# Altium footprint library MY_LIB_Connectors_JST.PcbLib: 118 footprints (part 5 of 8)
Each footprint in its own frame and in the unit in brackets; x right, y up, seen from the top. Pads: shape width x height; smd on the part's side, far side on the other; paste and mask are expansions set on the pad; w line width, h text height; cw(c..) or ccw(c..) is an arc to the next point about the centre after c.
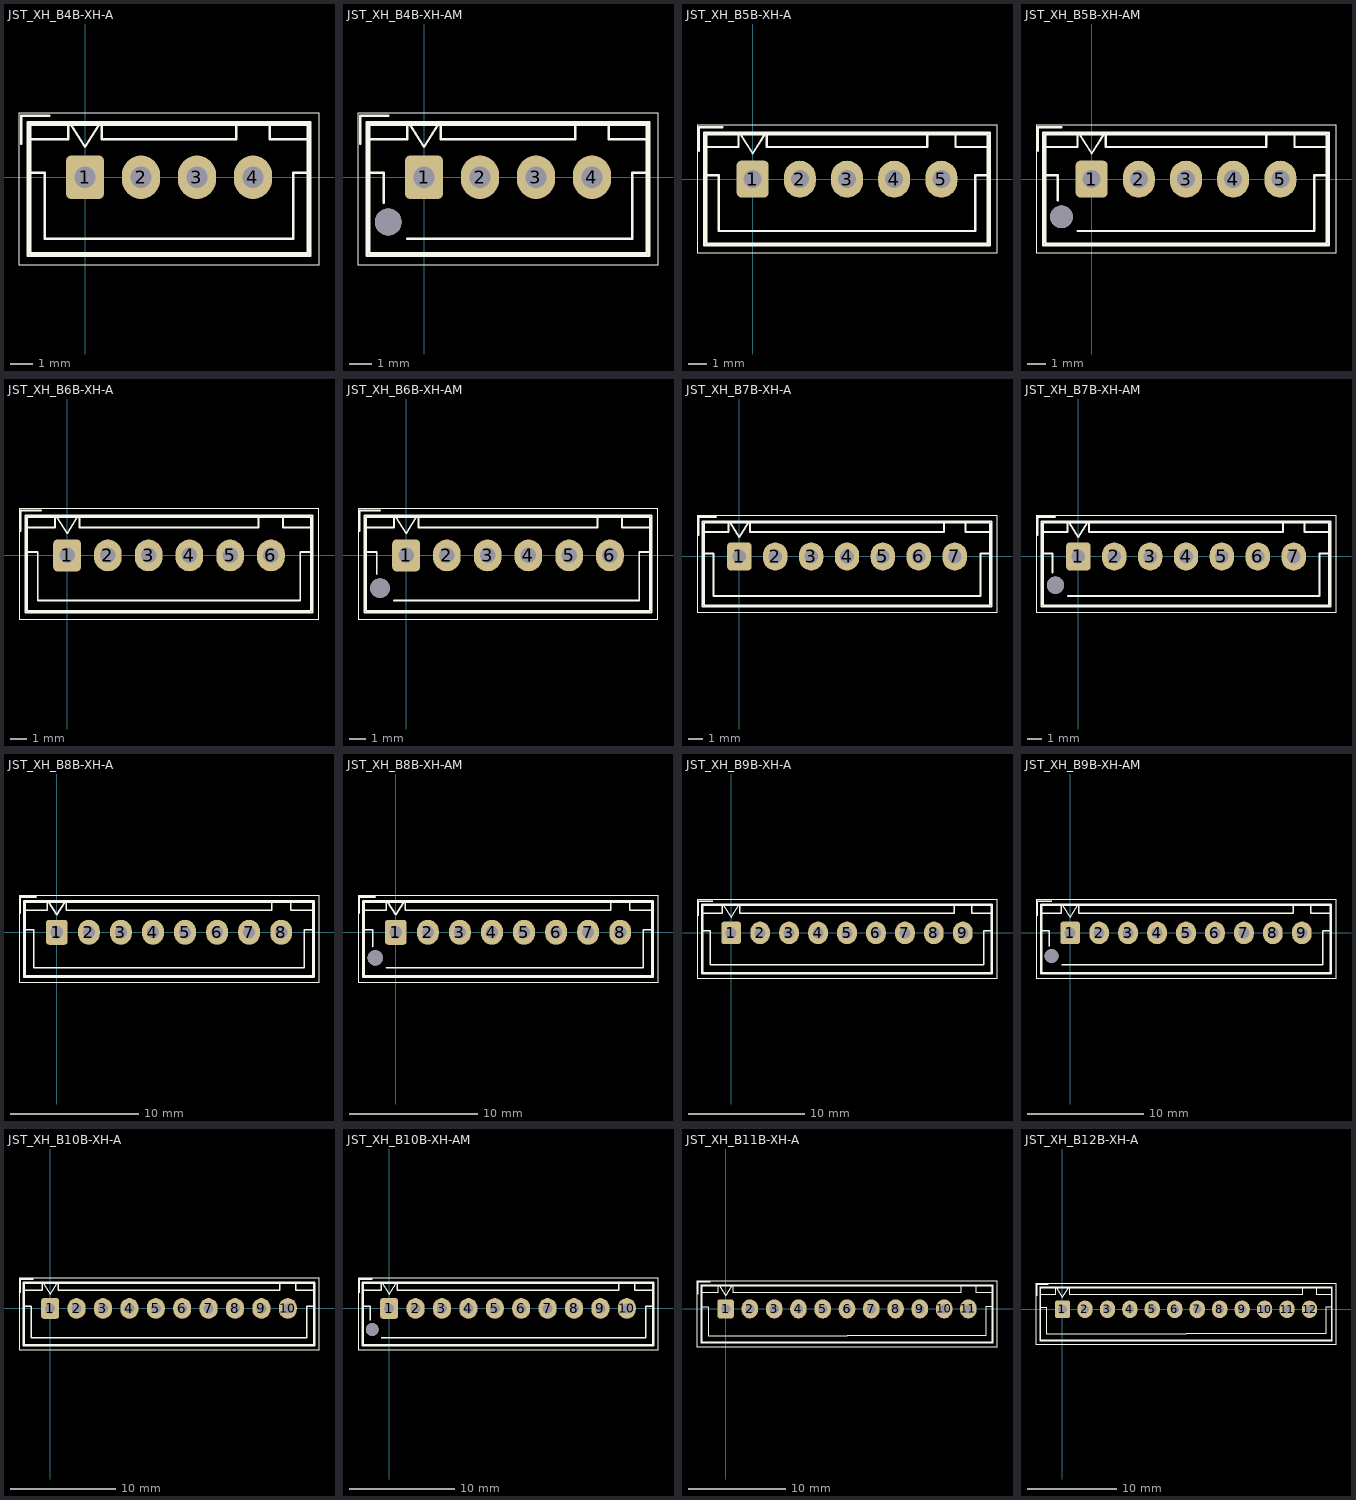
[diagram p4: the footprints below, top view; thin cyan lines are the x and y axes]

## JST_XH_B4B-XH-A [mm] "JST B4B-XH-A; reviewed KiCad footprint; ready STEP reference model"
height 7
pads (4):
  rrect29% 1.7x1.95 hole 0.95: 1(0,0)
  oval 1.7x1.95 hole 0.95: 2(2.5,0) 3(5,0) 4(7.5,0)
Top Overlay:
  lines w0.05: -2.95,-3.9 -2.95,2.85 10.45,2.85 10.45,-3.9 -2.95,-3.9
  lines w0.1: -0.625,2.35 0,1.35 0.625,2.35 ; -2.45,-3.4 -2.45,2.35 9.95,2.35 9.95,-3.4 -2.45,-3.4
  lines w0.12: -2.85,1.5 -2.85,2.75 -1.6,2.75 ; -2.55,0.2 -1.8,0.2 -1.8,-2.75 3.75,-2.75 9.3,-2.75 9.3,0.2 10.05,0.2 ; -2.56,-3.51 -2.56,2.46 10.06,2.46 10.06,-3.51 -2.56,-3.51 ; -2.55,1.7 -2.55,2.45 -0.75,2.45 -0.75,1.7 -2.55,1.7 ; 0.75,1.7 0.75,2.45 6.75,2.45 6.75,1.7 0.75,1.7 ; 8.25,1.7 8.25,2.45 10.05,2.45 10.05,1.7 8.25,1.7
3D body "JST_XH_B4B-XH-A_1x04_P2.50mm_Vertical.step": height 7, standoff -3.4, extent -2.45,-3.4 9.95,2.35

## JST_XH_B4B-XH-AM [mm] "JST B4B-XH-AM; reviewed KiCad footprint; ready STEP reference model"
height 7
pads (5):
  rrect29% 1.7x1.95 hole 0.95: 1(0,0)
  oval 1.7x1.95 hole 0.95: 2(2.5,0) 3(5,0) 4(7.5,0)
  round 1.2 hole 1.2 unplated: ""(-1.6,-2)
Top Overlay:
  lines w0.05: -2.95,-3.9 -2.95,2.85 10.45,2.85 10.45,-3.9 -2.95,-3.9
  lines w0.1: -0.625,2.35 0,1.35 0.625,2.35 ; -2.45,-3.4 -2.45,2.35 9.95,2.35 9.95,-3.4 -2.45,-3.4
  lines w0.12: -2.85,1.5 -2.85,2.75 -1.6,2.75 ; -2.55,0.2 -1.8,0.2 -1.8,-1.14 ; -0.74,-2.75 3.75,-2.75 9.3,-2.75 9.3,0.2 10.05,0.2 ; -2.56,-3.51 -2.56,2.46 10.06,2.46 10.06,-3.51 -2.56,-3.51 ; -2.55,1.7 -2.55,2.45 -0.75,2.45 -0.75,1.7 -2.55,1.7 ; 0.75,1.7 0.75,2.45 6.75,2.45 6.75,1.7 0.75,1.7 ; 8.25,1.7 8.25,2.45 10.05,2.45 10.05,1.7 8.25,1.7
3D body "B4B-XH-AM.step": height 7, standoff -3.5, extent -2.45,-3.4 9.95,2.35

## JST_XH_B5B-XH-A [mm] "JST B5B-XH-A; reviewed KiCad footprint; ready STEP reference model"
height 7
pads (5):
  rrect29% 1.7x1.95 hole 0.95: 1(0,0)
  oval 1.7x1.95 hole 0.95: 2(2.5,0) 3(5,0) 4(7.5,0) 5(10,0)
Top Overlay:
  lines w0.05: -2.95,-3.9 -2.95,2.85 12.95,2.85 12.95,-3.9 -2.95,-3.9
  lines w0.1: -0.625,2.35 0,1.35 0.625,2.35 ; -2.45,-3.4 -2.45,2.35 12.45,2.35 12.45,-3.4 -2.45,-3.4
  lines w0.12: -2.85,1.5 -2.85,2.75 -1.6,2.75 ; -2.55,0.2 -1.8,0.2 -1.8,-2.75 5,-2.75 11.8,-2.75 11.8,0.2 12.55,0.2 ; -2.56,-3.51 -2.56,2.46 12.56,2.46 12.56,-3.51 -2.56,-3.51 ; -2.55,1.7 -2.55,2.45 -0.75,2.45 -0.75,1.7 -2.55,1.7 ; 0.75,1.7 0.75,2.45 9.25,2.45 9.25,1.7 0.75,1.7 ; 10.75,1.7 10.75,2.45 12.55,2.45 12.55,1.7 10.75,1.7
3D body "JST_XH_B5B-XH-A_1x05_P2.50mm_Vertical.step": height 7, standoff -3.4, extent -2.45,-3.4 12.45,2.35

## JST_XH_B5B-XH-AM [mm] "JST B5B-XH-AM; reviewed KiCad footprint; ready STEP reference model"
height 7
pads (6):
  rrect29% 1.7x1.95 hole 0.95: 1(0,0)
  oval 1.7x1.95 hole 0.95: 2(2.5,0) 3(5,0) 4(7.5,0) 5(10,0)
  round 1.2 hole 1.2 unplated: ""(-1.6,-2)
Top Overlay:
  lines w0.05: -2.95,-3.9 -2.95,2.85 12.95,2.85 12.95,-3.9 -2.95,-3.9
  lines w0.1: -0.625,2.35 0,1.35 0.625,2.35 ; -2.45,-3.4 -2.45,2.35 12.45,2.35 12.45,-3.4 -2.45,-3.4
  lines w0.12: -2.85,1.5 -2.85,2.75 -1.6,2.75 ; -2.55,0.2 -1.8,0.2 -1.8,-1.14 ; -0.74,-2.75 5,-2.75 11.8,-2.75 11.8,0.2 12.55,0.2 ; -2.56,-3.51 -2.56,2.46 12.56,2.46 12.56,-3.51 -2.56,-3.51 ; -2.55,1.7 -2.55,2.45 -0.75,2.45 -0.75,1.7 -2.55,1.7 ; 0.75,1.7 0.75,2.45 9.25,2.45 9.25,1.7 0.75,1.7 ; 10.75,1.7 10.75,2.45 12.55,2.45 12.55,1.7 10.75,1.7
3D body "B5B-XH-AM.step": height 7, standoff -3.5, extent -2.45,-3.4 12.45,2.35

## JST_XH_B6B-XH-A [mm] "JST B6B-XH-A; reviewed KiCad footprint; ready STEP reference model"
height 7
pads (6):
  rrect29% 1.7x1.95 hole 0.95: 1(0,0)
  oval 1.7x1.95 hole 0.95: 2(2.5,0) 3(5,0) 4(7.5,0) 5(10,0) 6(12.5,0)
Top Overlay:
  lines w0.05: -2.95,-3.9 -2.95,2.85 15.45,2.85 15.45,-3.9 -2.95,-3.9
  lines w0.1: -0.625,2.35 0,1.35 0.625,2.35 ; -2.45,-3.4 -2.45,2.35 14.95,2.35 14.95,-3.4 -2.45,-3.4
  lines w0.12: -2.85,1.5 -2.85,2.75 -1.6,2.75 ; -2.55,0.2 -1.8,0.2 -1.8,-2.75 6.25,-2.75 14.3,-2.75 14.3,0.2 15.05,0.2 ; -2.56,-3.51 -2.56,2.46 15.06,2.46 15.06,-3.51 -2.56,-3.51 ; -2.55,1.7 -2.55,2.45 -0.75,2.45 -0.75,1.7 -2.55,1.7 ; 0.75,1.7 0.75,2.45 11.75,2.45 11.75,1.7 0.75,1.7 ; 13.25,1.7 13.25,2.45 15.05,2.45 15.05,1.7 13.25,1.7
3D body "JST_XH_B6B-XH-A_1x06_P2.50mm_Vertical.step": height 7, standoff -3.4, extent -2.45,-3.4 14.95,2.35

## JST_XH_B6B-XH-AM [mm] "JST B6B-XH-AM; reviewed KiCad footprint; ready STEP reference model"
height 7
pads (7):
  rrect29% 1.7x1.95 hole 0.95: 1(0,0)
  oval 1.7x1.95 hole 0.95: 2(2.5,0) 3(5,0) 4(7.5,0) 5(10,0) 6(12.5,0)
  round 1.2 hole 1.2 unplated: ""(-1.6,-2)
Top Overlay:
  lines w0.05: -2.95,-3.9 -2.95,2.85 15.45,2.85 15.45,-3.9 -2.95,-3.9
  lines w0.1: -0.625,2.35 0,1.35 0.625,2.35 ; -2.45,-3.4 -2.45,2.35 14.95,2.35 14.95,-3.4 -2.45,-3.4
  lines w0.12: -2.85,1.5 -2.85,2.75 -1.6,2.75 ; -2.55,0.2 -1.8,0.2 -1.8,-1.14 ; -0.74,-2.75 6.25,-2.75 14.3,-2.75 14.3,0.2 15.05,0.2 ; -2.56,-3.51 -2.56,2.46 15.06,2.46 15.06,-3.51 -2.56,-3.51 ; -2.55,1.7 -2.55,2.45 -0.75,2.45 -0.75,1.7 -2.55,1.7 ; 0.75,1.7 0.75,2.45 11.75,2.45 11.75,1.7 0.75,1.7 ; 13.25,1.7 13.25,2.45 15.05,2.45 15.05,1.7 13.25,1.7
3D body "B6B-XH-AM.step": height 7, standoff -3.5, extent -2.45,-3.4 14.95,2.35

## JST_XH_B7B-XH-A [mm] "JST B7B-XH-A; reviewed KiCad footprint; ready STEP reference model"
height 7
pads (7):
  rrect29% 1.7x1.95 hole 0.95: 1(0,0)
  oval 1.7x1.95 hole 0.95: 2(2.5,0) 3(5,0) 4(7.5,0) 5(10,0) 6(12.5,0) 7(15,0)
Top Overlay:
  lines w0.05: -2.95,-3.9 -2.95,2.85 17.95,2.85 17.95,-3.9 -2.95,-3.9
  lines w0.1: -0.625,2.35 0,1.35 0.625,2.35 ; -2.45,-3.4 -2.45,2.35 17.45,2.35 17.45,-3.4 -2.45,-3.4
  lines w0.12: -2.85,1.5 -2.85,2.75 -1.6,2.75 ; -2.55,0.2 -1.8,0.2 -1.8,-2.75 7.5,-2.75 16.8,-2.75 16.8,0.2 17.55,0.2 ; -2.56,-3.51 -2.56,2.46 17.56,2.46 17.56,-3.51 -2.56,-3.51 ; -2.55,1.7 -2.55,2.45 -0.75,2.45 -0.75,1.7 -2.55,1.7 ; 0.75,1.7 0.75,2.45 14.25,2.45 14.25,1.7 0.75,1.7 ; 15.75,1.7 15.75,2.45 17.55,2.45 17.55,1.7 15.75,1.7
3D body "JST_XH_B7B-XH-A_1x07_P2.50mm_Vertical.step": height 7, standoff -3.4, extent -2.45,-3.4 17.45,2.35

## JST_XH_B7B-XH-AM [mm] "JST B7B-XH-AM; reviewed KiCad footprint; ready STEP reference model"
height 7
pads (8):
  rrect29% 1.7x1.95 hole 0.95: 1(0,0)
  oval 1.7x1.95 hole 0.95: 2(2.5,0) 3(5,0) 4(7.5,0) 5(10,0) 6(12.5,0) 7(15,0)
  round 1.2 hole 1.2 unplated: ""(-1.6,-2)
Top Overlay:
  lines w0.05: -2.95,-3.9 -2.95,2.85 17.95,2.85 17.95,-3.9 -2.95,-3.9
  lines w0.1: -0.625,2.35 0,1.35 0.625,2.35 ; -2.45,-3.4 -2.45,2.35 17.45,2.35 17.45,-3.4 -2.45,-3.4
  lines w0.12: -2.85,1.5 -2.85,2.75 -1.6,2.75 ; -2.55,0.2 -1.8,0.2 -1.8,-1.14 ; -0.74,-2.75 7.5,-2.75 16.8,-2.75 16.8,0.2 17.55,0.2 ; -2.56,-3.51 -2.56,2.46 17.56,2.46 17.56,-3.51 -2.56,-3.51 ; -2.55,1.7 -2.55,2.45 -0.75,2.45 -0.75,1.7 -2.55,1.7 ; 0.75,1.7 0.75,2.45 14.25,2.45 14.25,1.7 0.75,1.7 ; 15.75,1.7 15.75,2.45 17.55,2.45 17.55,1.7 15.75,1.7
3D body "B7B-XH-AM.step": height 7, standoff -3.5, extent -2.45,-3.4 17.45,2.35

## JST_XH_B8B-XH-A [mm] "JST B8B-XH-A; reviewed KiCad footprint; ready STEP reference model"
height 7
pads (8):
  rrect29% 1.7x1.95 hole 0.95: 1(0,0)
  oval 1.7x1.95 hole 0.95: 2(2.5,0) 3(5,0) 4(7.5,0) 5(10,0) 6(12.5,0) 7(15,0) 8(17.5,0)
Top Overlay:
  lines w0.05: -2.95,-3.9 -2.95,2.85 20.45,2.85 20.45,-3.9 -2.95,-3.9
  lines w0.1: -0.625,2.35 0,1.35 0.625,2.35 ; -2.45,-3.4 -2.45,2.35 19.95,2.35 19.95,-3.4 -2.45,-3.4
  lines w0.12: -2.85,1.5 -2.85,2.75 -1.6,2.75 ; -2.55,0.2 -1.8,0.2 -1.8,-2.75 8.75,-2.75 19.3,-2.75 19.3,0.2 20.05,0.2 ; -2.56,-3.51 -2.56,2.46 20.06,2.46 20.06,-3.51 -2.56,-3.51 ; -2.55,1.7 -2.55,2.45 -0.75,2.45 -0.75,1.7 -2.55,1.7 ; 0.75,1.7 0.75,2.45 16.75,2.45 16.75,1.7 0.75,1.7 ; 18.25,1.7 18.25,2.45 20.05,2.45 20.05,1.7 18.25,1.7
3D body "JST_XH_B8B-XH-A_1x08_P2.50mm_Vertical.step": height 7, standoff -3.4, extent -2.45,-3.4 19.95,2.35

## JST_XH_B8B-XH-AM [mm] "JST B8B-XH-AM; reviewed KiCad footprint; ready STEP reference model"
height 7
pads (9):
  rrect29% 1.7x1.95 hole 0.95: 1(0,0)
  oval 1.7x1.95 hole 0.95: 2(2.5,0) 3(5,0) 4(7.5,0) 5(10,0) 6(12.5,0) 7(15,0) 8(17.5,0)
  round 1.2 hole 1.2 unplated: ""(-1.6,-2)
Top Overlay:
  lines w0.05: -2.95,-3.9 -2.95,2.85 20.45,2.85 20.45,-3.9 -2.95,-3.9
  lines w0.1: -0.625,2.35 0,1.35 0.625,2.35 ; -2.45,-3.4 -2.45,2.35 19.95,2.35 19.95,-3.4 -2.45,-3.4
  lines w0.12: -2.85,1.5 -2.85,2.75 -1.6,2.75 ; -2.55,0.2 -1.8,0.2 -1.8,-1.14 ; -0.74,-2.75 8.75,-2.75 19.3,-2.75 19.3,0.2 20.05,0.2 ; -2.56,-3.51 -2.56,2.46 20.06,2.46 20.06,-3.51 -2.56,-3.51 ; -2.55,1.7 -2.55,2.45 -0.75,2.45 -0.75,1.7 -2.55,1.7 ; 0.75,1.7 0.75,2.45 16.75,2.45 16.75,1.7 0.75,1.7 ; 18.25,1.7 18.25,2.45 20.05,2.45 20.05,1.7 18.25,1.7
3D body "B8B-XH-AM.step": height 7, standoff -3.5, extent -2.45,-3.4 19.95,2.35

## JST_XH_B9B-XH-A [mm] "JST B9B-XH-A; reviewed KiCad footprint; ready STEP reference model"
height 7
pads (9):
  rrect29% 1.7x1.95 hole 0.95: 1(0,0)
  oval 1.7x1.95 hole 0.95: 2(2.5,0) 3(5,0) 4(7.5,0) 5(10,0) 6(12.5,0) 7(15,0) 8(17.5,0) 9(20,0)
Top Overlay:
  lines w0.05: -2.95,-3.9 -2.95,2.85 22.95,2.85 22.95,-3.9 -2.95,-3.9
  lines w0.1: -0.625,2.35 0,1.35 0.625,2.35 ; -2.45,-3.4 -2.45,2.35 22.45,2.35 22.45,-3.4 -2.45,-3.4
  lines w0.12: -2.85,1.5 -2.85,2.75 -1.6,2.75 ; -2.55,0.2 -1.8,0.2 -1.8,-2.75 10,-2.75 21.8,-2.75 21.8,0.2 22.55,0.2 ; -2.56,-3.51 -2.56,2.46 22.56,2.46 22.56,-3.51 -2.56,-3.51 ; -2.55,1.7 -2.55,2.45 -0.75,2.45 -0.75,1.7 -2.55,1.7 ; 0.75,1.7 0.75,2.45 19.25,2.45 19.25,1.7 0.75,1.7 ; 20.75,1.7 20.75,2.45 22.55,2.45 22.55,1.7 20.75,1.7
3D body "JST_XH_B9B-XH-A_1x09_P2.50mm_Vertical.step": height 7, standoff -3.4, extent -2.45,-3.4 22.45,2.35

## JST_XH_B9B-XH-AM [mm] "JST B9B-XH-AM; reviewed KiCad footprint; ready STEP reference model"
height 7
pads (10):
  rrect29% 1.7x1.95 hole 0.95: 1(0,0)
  oval 1.7x1.95 hole 0.95: 2(2.5,0) 3(5,0) 4(7.5,0) 5(10,0) 6(12.5,0) 7(15,0) 8(17.5,0) 9(20,0)
  round 1.2 hole 1.2 unplated: ""(-1.6,-2)
Top Overlay:
  lines w0.05: -2.95,-3.9 -2.95,2.85 22.95,2.85 22.95,-3.9 -2.95,-3.9
  lines w0.1: -0.625,2.35 0,1.35 0.625,2.35 ; -2.45,-3.4 -2.45,2.35 22.45,2.35 22.45,-3.4 -2.45,-3.4
  lines w0.12: -2.85,1.5 -2.85,2.75 -1.6,2.75 ; -2.55,0.2 -1.8,0.2 -1.8,-1.14 ; -0.74,-2.75 10,-2.75 21.8,-2.75 21.8,0.2 22.55,0.2 ; -2.56,-3.51 -2.56,2.46 22.56,2.46 22.56,-3.51 -2.56,-3.51 ; -2.55,1.7 -2.55,2.45 -0.75,2.45 -0.75,1.7 -2.55,1.7 ; 0.75,1.7 0.75,2.45 19.25,2.45 19.25,1.7 0.75,1.7 ; 20.75,1.7 20.75,2.45 22.55,2.45 22.55,1.7 20.75,1.7
3D body "B9B-XH-AM.step": height 7, standoff -3.5, extent -2.45,-3.4 22.45,2.35

## JST_XH_B10B-XH-A [mm] "JST B10B-XH-A; reviewed KiCad footprint; ready STEP reference model"
height 7
pads (10):
  rrect29% 1.7x1.95 hole 0.95: 1(0,0)
  oval 1.7x1.95 hole 0.95: 2(2.5,0) 3(5,0) 4(7.5,0) 5(10,0) 6(12.5,0) 7(15,0) 8(17.5,0) 9(20,0) 10(22.5,0)
Top Overlay:
  lines w0.05: -2.95,-3.9 -2.95,2.85 25.45,2.85 25.45,-3.9 -2.95,-3.9
  lines w0.1: -0.625,2.35 0,1.35 0.625,2.35 ; -2.45,-3.4 -2.45,2.35 24.95,2.35 24.95,-3.4 -2.45,-3.4
  lines w0.12: -2.85,1.5 -2.85,2.75 -1.6,2.75 ; -2.55,0.2 -1.8,0.2 -1.8,-2.75 11.25,-2.75 24.3,-2.75 24.3,0.2 25.05,0.2 ; -2.56,-3.51 -2.56,2.46 25.06,2.46 25.06,-3.51 -2.56,-3.51 ; -2.55,1.7 -2.55,2.45 -0.75,2.45 -0.75,1.7 -2.55,1.7 ; 0.75,1.7 0.75,2.45 21.75,2.45 21.75,1.7 0.75,1.7 ; 23.25,1.7 23.25,2.45 25.05,2.45 25.05,1.7 23.25,1.7
3D body "JST_XH_B10B-XH-A_1x10_P2.50mm_Vertical.step": height 7, standoff -3.4, extent -2.45,-3.4 24.95,2.35

## JST_XH_B10B-XH-AM [mm] "JST B10B-XH-AM; reviewed KiCad footprint; ready STEP reference model"
height 7
pads (11):
  rrect29% 1.7x1.95 hole 0.95: 1(0,0)
  oval 1.7x1.95 hole 0.95: 2(2.5,0) 3(5,0) 4(7.5,0) 5(10,0) 6(12.5,0) 7(15,0) 8(17.5,0) 9(20,0) 10(22.5,0)
  round 1.2 hole 1.2 unplated: ""(-1.6,-2)
Top Overlay:
  lines w0.05: -2.95,-3.9 -2.95,2.85 25.45,2.85 25.45,-3.9 -2.95,-3.9
  lines w0.1: -0.625,2.35 0,1.35 0.625,2.35 ; -2.45,-3.4 -2.45,2.35 24.95,2.35 24.95,-3.4 -2.45,-3.4
  lines w0.12: -2.85,1.5 -2.85,2.75 -1.6,2.75 ; -2.55,0.2 -1.8,0.2 -1.8,-1.14 ; -0.74,-2.75 11.25,-2.75 24.3,-2.75 24.3,0.2 25.05,0.2 ; -2.56,-3.51 -2.56,2.46 25.06,2.46 25.06,-3.51 -2.56,-3.51 ; -2.55,1.7 -2.55,2.45 -0.75,2.45 -0.75,1.7 -2.55,1.7 ; 0.75,1.7 0.75,2.45 21.75,2.45 21.75,1.7 0.75,1.7 ; 23.25,1.7 23.25,2.45 25.05,2.45 25.05,1.7 23.25,1.7
3D body "B10B-XH-AM.step": height 7, standoff -3.5, extent -2.45,-3.4 24.95,2.35

## JST_XH_B11B-XH-A [mm] "JST B11B-XH-A; reviewed KiCad footprint; ready STEP reference model"
height 7
pads (11):
  rrect29% 1.7x1.95 hole 0.95: 1(0,0)
  oval 1.7x1.95 hole 0.95: 2(2.5,0) 3(5,0) 4(7.5,0) 5(10,0) 6(12.5,0) 7(15,0) 8(17.5,0) 9(20,0) 10(22.5,0) 11(25,0)
Top Overlay:
  lines w0.05: -2.95,-3.9 -2.95,2.85 27.95,2.85 27.95,-3.9 -2.95,-3.9
  lines w0.1: -0.625,2.35 0,1.35 0.625,2.35 ; -2.45,-3.4 -2.45,2.35 27.45,2.35 27.45,-3.4 -2.45,-3.4
  lines w0.12: -2.85,1.5 -2.85,2.75 -1.6,2.75 ; -2.55,0.2 -1.8,0.2 -1.8,-2.75 12.5,-2.75 26.8,-2.75 26.8,0.2 27.55,0.2 ; -2.56,-3.51 -2.56,2.46 27.56,2.46 27.56,-3.51 -2.56,-3.51 ; -2.55,1.7 -2.55,2.45 -0.75,2.45 -0.75,1.7 -2.55,1.7 ; 0.75,1.7 0.75,2.45 24.25,2.45 24.25,1.7 0.75,1.7 ; 25.75,1.7 25.75,2.45 27.55,2.45 27.55,1.7 25.75,1.7
3D body "JST_XH_B11B-XH-A_1x11_P2.50mm_Vertical.step": height 7, standoff -3.4, extent -2.45,-3.4 27.45,2.35

## JST_XH_B12B-XH-A [mm] "JST B12B-XH-A; reviewed KiCad footprint; ready STEP reference model"
height 7
pads (12):
  rrect29% 1.7x1.95 hole 0.95: 1(0,0)
  oval 1.7x1.95 hole 0.95: 2(2.5,0) 3(5,0) 4(7.5,0) 5(10,0) 6(12.5,0) 7(15,0) 8(17.5,0) 9(20,0) 10(22.5,0) 11(25,0) 12(27.5,0)
Top Overlay:
  lines w0.05: -2.95,-3.9 -2.95,2.85 30.45,2.85 30.45,-3.9 -2.95,-3.9
  lines w0.1: -0.625,2.35 0,1.35 0.625,2.35 ; -2.45,-3.4 -2.45,2.35 29.95,2.35 29.95,-3.4 -2.45,-3.4
  lines w0.12: -2.85,1.5 -2.85,2.75 -1.6,2.75 ; -2.55,0.2 -1.8,0.2 -1.8,-2.75 13.75,-2.75 29.3,-2.75 29.3,0.2 30.05,0.2 ; -2.56,-3.51 -2.56,2.46 30.06,2.46 30.06,-3.51 -2.56,-3.51 ; -2.55,1.7 -2.55,2.45 -0.75,2.45 -0.75,1.7 -2.55,1.7 ; 0.75,1.7 0.75,2.45 26.75,2.45 26.75,1.7 0.75,1.7 ; 28.25,1.7 28.25,2.45 30.05,2.45 30.05,1.7 28.25,1.7
3D body "JST_XH_B12B-XH-A_1x12_P2.50mm_Vertical.step": height 7, standoff -3.4, extent -2.45,-3.4 29.95,2.35